# Altium schematic symbol library 4N25SM.SchLib: 1 symbol
Pins are listed as number, name and electrical type; pins without a type are passive.

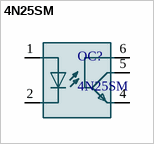
[diagram p0: symbol 4N25SM]

## 4N25SM
designator OC?
Optoisolator Transistor with Base Output 4170Vrms 1 Channel 6-SMD; MF: ON Semiconductor; MP: 4N25SM; Availability: Unavailable; SnapEDA_Link: https://www.snapeda.com/parts/4N25SM/ON%20Semiconductor/view-part/2630074/?ref=snap; Package: SMD-6 ON Semiconductor; Value: *; Price: None
footprint 4N25SM
pins: 1 A, 2 C, 4 EMI, 5 COL, 6 BAS